# Altium integrated library Tactical Switch 2 Pin SMD 3x4mm.IntLib: 1 symbol
Pins are listed as number, name and electrical type; pins without a type are passive.

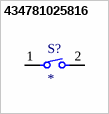
[diagram p0: symbol 434781025816]

## 434781025816
designator S?
6.2*4.1mm IP67 vertical type, SMT, height 2.5mm, Black silicone rubber actuator, 160gf, T&R; MF: Wurth Elektronik; MP: 434781025816; SnapEDA_Link: https://www.snapeda.com/parts/434781025816/Wurth+Electronics/view-part/?ref=snap; Package: None; Value: *; Check_prices: https://www.snapeda.com/parts/434781025816/Wurth+Electronics/view-part/?ref=eda
footprint 434781025816
pins: 1, 2